# Altium schematic symbol library 445I23D25M00000.SchLib: 1 symbol
Pins are listed as number, name and electrical type; pins without a type are passive.

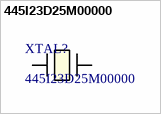
[diagram p0: symbol 445I23D25M00000]

## 445I23D25M00000
designator XTAL?
Description; Manufacturer_Name: CTS Components; Copyright: Copyright (C) 2025 Ultra Librarian. All rights reserved.; Manufacturer_Part_Number: 445I23D25M00000
footprint XTAL_445I23D25M00000_CTS
pins: 1, 2